# Altium footprint library LimeMicroAltiumLib.PcbLib: 876 footprints (part 16 of 57)
Each footprint in its own frame and in the unit in brackets; x right, y up, seen from the top. Pads: shape width x height; smd on the part's side, far side on the other; paste and mask are expansions set on the pad; w line width, h text height; cw(c..) or ccw(c..) is an arc to the next point about the centre after c.
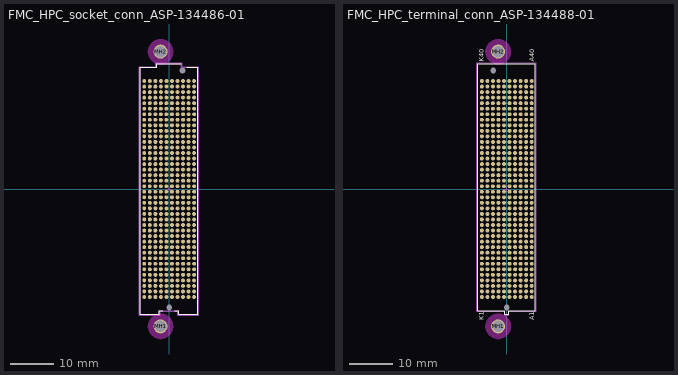
[diagram p15: the footprints below, top view; thin cyan lines are the x and y axes]

## FMC_HPC_socket_conn_ASP-134486-01 [mm]
pads (404):
  round 0.9 smd: A1(5.715,24.765) A2(5.715,23.495) A3(5.715,22.225) A4(5.715,20.955) A5(5.715,19.685) A6(5.715,18.415) A7(5.715,17.145) A8(5.715,15.875) A9(5.715,14.605) A10(5.715,13.335) A11(5.715,12.065) A12(5.715,10.795) A13(5.715,9.525) A14(5.715,8.255) A15(5.715,6.985) A16(5.715,5.715) A17(5.715,4.445) A18(5.715,3.175) A19(5.715,1.905) A20(5.715,0.635) A21(5.715,-0.635) A22(5.715,-1.905) A23(5.715,-3.175) A24(5.715,-4.445) A25(5.715,-5.715) A26(5.715,-6.985) A27(5.715,-8.255) A28(5.715,-9.525) A29(5.715,-10.795) A30(5.715,-12.065) A31(5.715,-13.335) A32(5.715,-14.605) A33(5.715,-15.875) A34(5.715,-17.145) A35(5.715,-18.415) A36(5.715,-19.685) A37(5.715,-20.955) A38(5.715,-22.225) A39(5.715,-23.495) A40(5.715,-24.765) B1(4.445,24.765) B2(4.445,23.495) B3(4.445,22.225) B4(4.445,20.955) B5(4.445,19.685) B6(4.445,18.415) B7(4.445,17.145) B8(4.445,15.875) B9(4.445,14.605) B10(4.445,13.335) B11(4.445,12.065) B12(4.445,10.795) B13(4.445,9.525) B14(4.445,8.255) B15(4.445,6.985) B16(4.445,5.715) B17(4.445,4.445) B18(4.445,3.175) B19(4.445,1.905) B20(4.445,0.635) B21(4.445,-0.635) B22(4.445,-1.905) B23(4.445,-3.175) B24(4.445,-4.445) B25(4.445,-5.715) B26(4.445,-6.985) B27(4.445,-8.255) B28(4.445,-9.525) B29(4.445,-10.795) B30(4.445,-12.065) B31(4.445,-13.335) B32(4.445,-14.605) B33(4.445,-15.875) B34(4.445,-17.145) B35(4.445,-18.415) B36(4.445,-19.685) B37(4.445,-20.955) B38(4.445,-22.225) B39(4.445,-23.495) B40(4.445,-24.765) C1(3.175,24.765) C2(3.175,23.495) C3(3.175,22.225) C4(3.175,20.955) C5(3.175,19.685) C6(3.175,18.415) C7(3.175,17.145) C8(3.175,15.875) C9(3.175,14.605) C10(3.175,13.335) C11(3.175,12.065) C12(3.175,10.795) C13(3.175,9.525) C14(3.175,8.255) C15(3.175,6.985) C16(3.175,5.715) C17(3.175,4.445) C18(3.175,3.175) C19(3.175,1.905) C20(3.175,0.635) C21(3.175,-0.635) C22(3.175,-1.905) C23(3.175,-3.175) C24(3.175,-4.445) C25(3.175,-5.715) C26(3.175,-6.985) C27(3.175,-8.255) C28(3.175,-9.525) C29(3.175,-10.795) C30(3.175,-12.065) C31(3.175,-13.335) C32(3.175,-14.605) C33(3.175,-15.875) C34(3.175,-17.145) C35(3.175,-18.415) C36(3.175,-19.685) C37(3.175,-20.955) C38(3.175,-22.225) C39(3.175,-23.495) C40(3.175,-24.765) D1(1.905,24.765) D2(1.905,23.495) D3(1.905,22.225) D4(1.905,20.955) D5(1.905,19.685) D6(1.905,18.415) D7(1.905,17.145) D8(1.905,15.875) D9(1.905,14.605) D10(1.905,13.335) D11(1.905,12.065) D12(1.905,10.795) D13(1.905,9.525) D14(1.905,8.255) D15(1.905,6.985) D16(1.905,5.715) D17(1.905,4.445) D18(1.905,3.175) D19(1.905,1.905) D20(1.905,0.635) D21(1.905,-0.635) D22(1.905,-1.905) D23(1.905,-3.175) D24(1.905,-4.445) D25(1.905,-5.715) D26(1.905,-6.985) D27(1.905,-8.255) D28(1.905,-9.525) D29(1.905,-10.795) D30(1.905,-12.065) D31(1.905,-13.335) D32(1.905,-14.605) D33(1.905,-15.875) D34(1.905,-17.145) D35(1.905,-18.415) D36(1.905,-19.685) D37(1.905,-20.955) D38(1.905,-22.225) D39(1.905,-23.495) D40(1.905,-24.765) E1(0.635,24.765) E2(0.635,23.495) E3(0.635,22.225) E4(0.635,20.955) E5(0.635,19.685) E6(0.635,18.415) E7(0.635,17.145) E8(0.635,15.875) E9(0.635,14.605) E10(0.635,13.335) E11(0.635,12.065) E12(0.635,10.795) E13(0.635,9.525) E14(0.635,8.255) E15(0.635,6.985) E16(0.635,5.715) E17(0.635,4.445) E18(0.635,3.175) E19(0.635,1.905) E20(0.635,0.635) E21(0.635,-0.635) E22(0.635,-1.905) E23(0.635,-3.175) E24(0.635,-4.445) E25(0.635,-5.715) E26(0.635,-6.985) E27(0.635,-8.255) E28(0.635,-9.525) E29(0.635,-10.795) E30(0.635,-12.065) E31(0.635,-13.335) E32(0.635,-14.605) E33(0.635,-15.875) E34(0.635,-17.145) E35(0.635,-18.415) E36(0.635,-19.685) E37(0.635,-20.955) E38(0.635,-22.225) E39(0.635,-23.495) E40(0.635,-24.765) F1(-0.635,24.765) F2(-0.635,23.495) F3(-0.635,22.225) F4(-0.635,20.955) F5(-0.635,19.685) F6(-0.635,18.415) F7(-0.635,17.145) F8(-0.635,15.875) F9(-0.635,14.605) F10(-0.635,13.335) F11(-0.635,12.065) F12(-0.635,10.795) F13(-0.635,9.525) F14(-0.635,8.255) F15(-0.635,6.985) F16(-0.635,5.715) F17(-0.635,4.445) F18(-0.635,3.175) F19(-0.635,1.905) F20(-0.635,0.635) F21(-0.635,-0.635) F22(-0.635,-1.905) F23(-0.635,-3.175) F24(-0.635,-4.445) F25(-0.635,-5.715) F26(-0.635,-6.985) F27(-0.635,-8.255) F28(-0.635,-9.525) F29(-0.635,-10.795) F30(-0.635,-12.065) F31(-0.635,-13.335) F32(-0.635,-14.605) F33(-0.635,-15.875) F34(-0.635,-17.145) F35(-0.635,-18.415) F36(-0.635,-19.685) F37(-0.635,-20.955) F38(-0.635,-22.225) F39(-0.635,-23.495) F40(-0.635,-24.765) G1(-1.905,24.765) G2(-1.905,23.495) G3(-1.905,22.225) G4(-1.905,20.955) G5(-1.905,19.685) G6(-1.905,18.415) G7(-1.905,17.145) G8(-1.905,15.875) G9(-1.905,14.605) G10(-1.905,13.335) G11(-1.905,12.065) G12(-1.905,10.795) G13(-1.905,9.525) G14(-1.905,8.255) G15(-1.905,6.985) G16(-1.905,5.715) G17(-1.905,4.445) G18(-1.905,3.175) G19(-1.905,1.905) G20(-1.905,0.635) G21(-1.905,-0.635) G22(-1.905,-1.905) G23(-1.905,-3.175) G24(-1.905,-4.445) G25(-1.905,-5.715) G26(-1.905,-6.985) G27(-1.905,-8.255) G28(-1.905,-9.525) G29(-1.905,-10.795) G30(-1.905,-12.065) G31(-1.905,-13.335) G32(-1.905,-14.605) G33(-1.905,-15.875) G34(-1.905,-17.145) G35(-1.905,-18.415) G36(-1.905,-19.685) G37(-1.905,-20.955) G38(-1.905,-22.225) G39(-1.905,-23.495) G40(-1.905,-24.765) H1(-3.175,24.765) H2(-3.175,23.495) H3(-3.175,22.225) H4(-3.175,20.955) H5(-3.175,19.685) H6(-3.175,18.415) H7(-3.175,17.145) H8(-3.175,15.875) H9(-3.175,14.605) H10(-3.175,13.335) H11(-3.175,12.065) H12(-3.175,10.795) H13(-3.175,9.525) H14(-3.175,8.255) H15(-3.175,6.985) H16(-3.175,5.715) H17(-3.175,4.445) H18(-3.175,3.175) H19(-3.175,1.905) H20(-3.175,0.635) H21(-3.175,-0.635) H22(-3.175,-1.905) H23(-3.175,-3.175) H24(-3.175,-4.445) H25(-3.175,-5.715) H26(-3.175,-6.985) H27(-3.175,-8.255) H28(-3.175,-9.525) H29(-3.175,-10.795) H30(-3.175,-12.065) H31(-3.175,-13.335) H32(-3.175,-14.605) H33(-3.175,-15.875) H34(-3.175,-17.145) H35(-3.175,-18.415) H36(-3.175,-19.685) H37(-3.175,-20.955) H38(-3.175,-22.225) H39(-3.175,-23.495) H40(-3.175,-24.765) J1(-4.445,24.765) J2(-4.445,23.495) J3(-4.445,22.225) J4(-4.445,20.955) J5(-4.445,19.685) J6(-4.445,18.415) J7(-4.445,17.145) J8(-4.445,15.875) J9(-4.445,14.605) J10(-4.445,13.335) J11(-4.445,12.065) J12(-4.445,10.795) J13(-4.445,9.525) J14(-4.445,8.255) J15(-4.445,6.985) J16(-4.445,5.715) J17(-4.445,4.445) J18(-4.445,3.175) J19(-4.445,1.905) J20(-4.445,0.635) J21(-4.445,-0.635) J22(-4.445,-1.905) J23(-4.445,-3.175) J24(-4.445,-4.445) J25(-4.445,-5.715) J26(-4.445,-6.985) J27(-4.445,-8.255) J28(-4.445,-9.525) J29(-4.445,-10.795) J30(-4.445,-12.065) J31(-4.445,-13.335) J32(-4.445,-14.605) J33(-4.445,-15.875) J34(-4.445,-17.145) J35(-4.445,-18.415) J36(-4.445,-19.685) J37(-4.445,-20.955) J38(-4.445,-22.225) J39(-4.445,-23.495) J40(-4.445,-24.765) K1(-5.715,24.765) K2(-5.715,23.495) K3(-5.715,22.225) K4(-5.715,20.955) K5(-5.715,19.685) K6(-5.715,18.415) K7(-5.715,17.145) K8(-5.715,15.875) K9(-5.715,14.605) K10(-5.715,13.335) K11(-5.715,12.065) K12(-5.715,10.795) K13(-5.715,9.525) K14(-5.715,8.255) K15(-5.715,6.985) K16(-5.715,5.715) K17(-5.715,4.445) K18(-5.715,3.175) K19(-5.715,1.905) K20(-5.715,0.635) K21(-5.715,-0.635) K22(-5.715,-1.905) K23(-5.715,-3.175) K24(-5.715,-4.445) K25(-5.715,-5.715) K26(-5.715,-6.985) K27(-5.715,-8.255) K28(-5.715,-9.525) K29(-5.715,-10.795) K30(-5.715,-12.065) K31(-5.715,-13.335) K32(-5.715,-14.605) K33(-5.715,-15.875) K34(-5.715,-17.145) K35(-5.715,-18.415) K36(-5.715,-19.685) K37(-5.715,-20.955) K38(-5.715,-22.225) K39(-5.715,-23.495) K40(-5.715,-24.765)
  round 3.2 hole 2.7: MH1(-1.98,-31.5) MH2(-1.98,31.5)
  round 0.97 hole 1.27 unplated: MH1(0,-27.18) MH2(3.05,27.18)
Top Layer keep-out:
  region: -1.98,-34.4 -2.17,-34.4 -2.547,-34.35 -2.914,-34.252 -3.265,-34.107 -3.595,-33.916 -3.896,-33.685 -4.165,-33.416 -4.396,-33.115 -4.587,-32.785 -4.732,-32.434 -4.83,-32.067 -4.88,-31.69 -4.88,-31.5 -4.88,-31.31 -4.83,-30.933 -4.732,-30.566 -4.587,-30.215 -4.396,-29.885 -4.165,-29.584 -3.896,-29.315 -3.595,-29.084 -3.265,-28.893 -2.914,-28.748 -2.547,-28.65 -2.17,-28.6 -1.98,-28.6 -1.79,-28.6 -1.413,-28.65 -1.046,-28.748 -0.695,-28.893 -0.365,-29.084 -0.064,-29.315 0.205,-29.584 0.436,-29.885 0.627,-30.215 0.772,-30.566 0.87,-30.933 0.92,-31.31 0.92,-31.5 0.92,-31.69 0.87,-32.067 0.772,-32.434 0.627,-32.785 0.436,-33.115 0.205,-33.416 -0.064,-33.685 -0.365,-33.916 -0.695,-34.107 -1.046,-34.252 -1.413,-34.35 -1.79,-34.4
  region: -1.98,28.6 -2.17,28.6 -2.547,28.65 -2.914,28.748 -3.265,28.893 -3.595,29.084 -3.896,29.315 -4.165,29.584 -4.396,29.885 -4.587,30.215 -4.732,30.566 -4.83,30.933 -4.88,31.31 -4.88,31.5 -4.88,31.69 -4.83,32.067 -4.732,32.434 -4.587,32.785 -4.396,33.115 -4.165,33.416 -3.896,33.685 -3.595,33.916 -3.265,34.107 -2.914,34.252 -2.547,34.35 -2.17,34.4 -1.98,34.4 -1.79,34.4 -1.413,34.35 -1.046,34.252 -0.695,34.107 -0.365,33.916 -0.064,33.685 0.205,33.416 0.436,33.115 0.627,32.785 0.772,32.434 0.87,32.067 0.92,31.69 0.92,31.5 0.92,31.31 0.87,30.933 0.772,30.566 0.627,30.215 0.436,29.885 0.205,29.584 -0.064,29.315 -0.365,29.084 -0.695,28.893 -1.046,28.748 -1.413,28.65 -1.79,28.6
Top Overlay:
  lines w0.2: -6.662,-28.727 -6.662,27.89 ; -6.66,-28.727 -2.241,-28.727 -2.241,-27.889 -1.5,-27.889 ; -6.66,27.889 -2.888,27.889 -2.888,28.727 2.801,28.727 ; 1.25,-27.889 2.153,-27.889 2.153,-28.727 6.574,-28.727 ; 4,27.889 6.573,27.889 6.573,-28.727
Mechanical 13:
  lines w0.1: -6.662,-28.727 -6.662,27.89 ; -6.66,-28.727 -2.241,-28.727 -2.241,-27.889 2.153,-27.889 2.153,-28.727 6.574,-28.727 ; -6.66,27.889 -2.888,27.889 -2.888,28.727 2.801,28.727 2.801,27.889 6.573,27.889 6.573,-28.727
Mechanical 15:
  lines w0.15: -0.5,0 0.5,0 ; 0,-0.5 0,0.5 ; -6.862,-28.927 -2.041,-28.927 -2.041,-28.089 1.953,-28.089 1.953,-28.927 6.773,-28.927 6.773,28.089 3.001,28.089 3.001,28.927 -3.088,28.927 -3.088,28.089 -6.862,28.089 -6.862,-28.927
  text ".Designator" at -0.1,0 h0.55
3D body: height 2, standoff 0.25, extent -0.806,-27.889 0.718,-26.492
3D body: height 0.73, standoff -1.27, extent -0.61,-27.736 0.508,-26.62
3D body: height 6.24, standoff 2.16, extent 3.697,-25.019 3.836,25.019
3D body: height 6.55, standoff 2.16, extent 3.281,25.019 4.252,25.502
3D body: height 6.55, standoff 2.16, extent 3.281,23.749 4.252,24.511
3D body: height 6.55, standoff 2.16, extent 3.281,22.479 4.252,23.241
3D body: height 6.55, standoff 2.16, extent 3.281,21.209 4.252,21.971
3D body: height 6.55, standoff 2.16, extent 3.281,19.939 4.252,20.701
3D body: height 6.55, standoff 2.16, extent 3.281,18.669 4.252,19.431
3D body: height 6.55, standoff 2.16, extent 3.281,17.399 4.252,18.161
3D body: height 6.55, standoff 2.16, extent 3.281,16.129 4.252,16.891
3D body: height 6.55, standoff 2.16, extent 3.281,14.859 4.252,15.621
3D body: height 6.55, standoff 2.16, extent 3.281,13.589 4.252,14.351
3D body: height 6.55, standoff 2.16, extent 3.281,12.319 4.252,13.081
3D body: height 6.55, standoff 2.16, extent 3.281,11.049 4.252,11.811
3D body: height 6.55, standoff 2.16, extent 3.281,9.779 4.252,10.541
3D body: height 6.55, standoff 2.16, extent 3.281,8.509 4.252,9.271
3D body: height 6.55, standoff 2.16, extent 3.281,7.239 4.252,8.001
3D body: height 6.55, standoff 2.16, extent 3.281,5.969 4.252,6.731
3D body: height 6.55, standoff 2.16, extent 3.281,4.699 4.252,5.461
3D body: height 6.55, standoff 2.16, extent 3.281,3.429 4.252,4.191
3D body: height 6.55, standoff 2.16, extent 3.281,2.159 4.252,2.921
3D body: height 6.55, standoff 2.16, extent 3.281,0.889 4.252,1.651
3D body: height 6.55, standoff 2.16, extent 3.281,-0.381 4.252,0.381
3D body: height 6.55, standoff 2.16, extent 3.281,-1.651 4.252,-0.889
3D body: height 6.55, standoff 2.16, extent 3.281,-2.921 4.252,-2.159
3D body: height 6.55, standoff 2.16, extent 3.281,-4.191 4.252,-3.429
3D body: height 6.55, standoff 2.16, extent 3.281,-5.461 4.252,-4.699
3D body: height 6.55, standoff 2.16, extent 3.281,-6.731 4.252,-5.969
3D body: height 6.55, standoff 2.16, extent 3.281,-8.001 4.252,-7.239
3D body: height 6.55, standoff 2.16, extent 3.281,-9.271 4.252,-8.509
3D body: height 6.55, standoff 2.16, extent 3.281,-10.541 4.252,-9.779
3D body: height 6.55, standoff 2.16, extent 3.281,-11.811 4.252,-11.049
3D body: height 6.55, standoff 2.16, extent 3.281,-13.081 4.252,-12.319
3D body: height 6.55, standoff 2.16, extent 3.281,-14.351 4.252,-13.589
3D body: height 6.55, standoff 2.16, extent 3.281,-15.621 4.252,-14.859
3D body: height 6.55, standoff 2.16, extent 3.281,-16.891 4.252,-16.129
3D body: height 6.55, standoff 2.16, extent 3.281,-18.161 4.252,-17.399
3D body: height 6.55, standoff 2.16, extent 3.281,-19.431 4.252,-18.669
3D body: height 6.55, standoff 2.16, extent 3.281,-20.701 4.252,-19.939
3D body: height 6.55, standoff 2.16, extent 3.281,-21.971 4.252,-21.209
3D body: height 6.55, standoff 2.16, extent 3.281,-23.241 4.252,-22.479
3D body: height 6.55, standoff 2.16, extent 3.281,-24.511 4.252,-23.749
3D body: height 2, standoff 0.51, extent -5.771,26.493 -3.853,27.255
3D body: height 2, standoff 0.51, extent 3.766,26.492 5.685,27.254
3D body: height 2, standoff 0, extent -3.854,26.492 -2.33,27.889
3D body: height 2, standoff 0, extent -0.806,26.492 0.718,27.889
3D body: height 2, standoff 0.25, extent 2.242,26.492 3.766,27.889
3D body: height 6.55, standoff 1.92, extent -6.662,27.053 6.571,28.729
3D body: height 2, standoff 0.51, extent -6.279,-27.889 5.684,-26.492
3D body: height 6.55, standoff 0, extent 5.685,-27.889 6.573,-26.493
3D body: height 2, standoff 0, extent 2.242,-27.889 3.766,-26.492
3D body: height 2, standoff 0, extent -3.854,-27.889 -2.33,-26.492
3D body: height 6.55, standoff 0, extent -6.66,-27.889 -5.772,-26.493
3D body: height 6.55, standoff 1.92, extent -6.659,-28.727 6.574,-27.052
3D body: height 6.55, standoff 0, extent 5.685,26.493 6.573,27.889
3D body: height 6.55, standoff 0, extent -6.662,26.494 -5.774,27.89
3D body: height 2, standoff 0.51, extent -3.854,26.492 3.766,27.889
3D body: height 6.55, standoff 2.16, extent 3.281,-25.502 4.252,-25.019
3D body: height 6.55, standoff 2.16, extent 0.741,-25.502 1.712,-25.019
3D body: height 6.55, standoff 2.16, extent 0.741,-24.511 1.712,-23.749
3D body: height 6.55, standoff 2.16, extent 0.741,-23.241 1.712,-22.479
3D body: height 6.55, standoff 2.16, extent 0.741,-21.971 1.712,-21.209
3D body: height 6.55, standoff 2.16, extent 0.741,-20.701 1.712,-19.939
3D body: height 6.55, standoff 2.16, extent 0.741,-19.431 1.712,-18.669
3D body: height 6.55, standoff 2.16, extent 0.741,-18.161 1.712,-17.399
3D body: height 6.55, standoff 2.16, extent 0.741,-16.891 1.712,-16.129
3D body: height 6.55, standoff 2.16, extent 0.741,-15.621 1.712,-14.859
3D body: height 6.55, standoff 2.16, extent 0.741,-14.351 1.712,-13.589
3D body: height 6.55, standoff 2.16, extent 0.741,-13.081 1.712,-12.319
3D body: height 6.55, standoff 2.16, extent 0.741,-11.811 1.712,-11.049
3D body: height 6.55, standoff 2.16, extent 0.741,-10.541 1.712,-9.779
3D body: height 6.55, standoff 2.16, extent 0.741,-9.271 1.712,-8.509
3D body: height 6.55, standoff 2.16, extent 0.741,-8.001 1.712,-7.239
3D body: height 6.55, standoff 2.16, extent 0.741,-6.731 1.712,-5.969
3D body: height 6.55, standoff 2.16, extent 0.741,-5.461 1.712,-4.699
3D body: height 6.55, standoff 2.16, extent 0.741,-4.191 1.712,-3.429
3D body: height 6.55, standoff 2.16, extent 0.741,-2.921 1.712,-2.159
3D body: height 6.55, standoff 2.16, extent 0.741,-1.651 1.712,-0.889
3D body: height 6.55, standoff 2.16, extent 0.741,-0.381 1.712,0.381
3D body: height 6.55, standoff 2.16, extent 0.741,0.889 1.712,1.651
3D body: height 6.55, standoff 2.16, extent 0.741,2.159 1.712,2.921
3D body: height 6.55, standoff 2.16, extent 0.741,3.429 1.712,4.191
3D body: height 6.55, standoff 2.16, extent 0.741,4.699 1.712,5.461
3D body: height 6.55, standoff 2.16, extent 0.741,5.969 1.712,6.731
3D body: height 6.55, standoff 2.16, extent 0.741,7.239 1.712,8.001
3D body: height 6.55, standoff 2.16, extent 0.741,8.509 1.712,9.271
3D body: height 6.55, standoff 2.16, extent 0.741,9.779 1.712,10.541
3D body: height 6.55, standoff 2.16, extent 0.741,11.049 1.712,11.811
3D body: height 6.55, standoff 2.16, extent 0.741,12.319 1.712,13.081
3D body: height 6.55, standoff 2.16, extent 0.741,13.589 1.712,14.351
3D body: height 6.55, standoff 2.16, extent 0.741,14.859 1.712,15.621
3D body: height 6.55, standoff 2.16, extent 0.741,16.129 1.712,16.891
3D body: height 6.55, standoff 2.16, extent 0.741,17.399 1.712,18.161
3D body: height 6.55, standoff 2.16, extent 0.741,18.669 1.712,19.431
3D body: height 6.55, standoff 2.16, extent 0.741,19.939 1.712,20.701
3D body: height 6.55, standoff 2.16, extent 0.741,21.209 1.712,21.971
3D body: height 6.55, standoff 2.16, extent 0.741,22.479 1.712,23.241
3D body: height 6.55, standoff 2.16, extent 0.741,23.749 1.712,24.511
3D body: height 6.55, standoff 2.16, extent 0.741,25.019 1.712,25.502
3D body: height 6.24, standoff 2.16, extent 1.157,-25.019 1.296,25.019
3D body: height 6.55, standoff 2.16, extent -1.799,-25.502 -0.828,-25.019
3D body: height 6.55, standoff 2.16, extent -1.799,-24.511 -0.828,-23.749
3D body: height 6.55, standoff 2.16, extent -1.799,-23.241 -0.828,-22.479
3D body: height 6.55, standoff 2.16, extent -1.799,-21.971 -0.828,-21.209
3D body: height 6.55, standoff 2.16, extent -1.799,-20.701 -0.828,-19.939
3D body: height 6.55, standoff 2.16, extent -1.799,-19.431 -0.828,-18.669
3D body: height 6.55, standoff 2.16, extent -1.799,-18.161 -0.828,-17.399
3D body: height 6.55, standoff 2.16, extent -1.799,-16.891 -0.828,-16.129
3D body: height 6.55, standoff 2.16, extent -1.799,-15.621 -0.828,-14.859
3D body: height 6.55, standoff 2.16, extent -1.799,-14.351 -0.828,-13.589
3D body: height 6.55, standoff 2.16, extent -1.799,-13.081 -0.828,-12.319
3D body: height 6.55, standoff 2.16, extent -1.799,-11.811 -0.828,-11.049
3D body: height 6.55, standoff 2.16, extent -1.799,-10.541 -0.828,-9.779
3D body: height 6.55, standoff 2.16, extent -1.799,-9.271 -0.828,-8.509
3D body: height 6.55, standoff 2.16, extent -1.799,-8.001 -0.828,-7.239
3D body: height 6.55, standoff 2.16, extent -1.799,-6.731 -0.828,-5.969
3D body: height 6.55, standoff 2.16, extent -1.799,-5.461 -0.828,-4.699
3D body: height 6.55, standoff 2.16, extent -1.799,-4.191 -0.828,-3.429
3D body: height 6.55, standoff 2.16, extent -1.799,-2.921 -0.828,-2.159
3D body: height 6.55, standoff 2.16, extent -1.799,-1.651 -0.828,-0.889
3D body: height 6.55, standoff 2.16, extent -1.799,-0.381 -0.828,0.381
3D body: height 6.55, standoff 2.16, extent -1.799,0.889 -0.828,1.651
3D body: height 6.55, standoff 2.16, extent -1.799,2.159 -0.828,2.921
3D body: height 6.55, standoff 2.16, extent -1.799,3.429 -0.828,4.191
3D body: height 6.55, standoff 2.16, extent -1.799,4.699 -0.828,5.461
3D body: height 6.55, standoff 2.16, extent -1.799,5.969 -0.828,6.731
3D body: height 6.55, standoff 2.16, extent -1.799,7.239 -0.828,8.001
3D body: height 6.55, standoff 2.16, extent -1.799,8.509 -0.828,9.271
3D body: height 6.55, standoff 2.16, extent -1.799,9.779 -0.828,10.541
3D body: height 6.55, standoff 2.16, extent -1.799,11.049 -0.828,11.811
3D body: height 6.55, standoff 2.16, extent -1.799,12.319 -0.828,13.081
3D body: height 6.55, standoff 2.16, extent -1.799,13.589 -0.828,14.351
3D body: height 6.55, standoff 2.16, extent -1.799,14.859 -0.828,15.621
3D body: height 6.55, standoff 2.16, extent -1.799,16.129 -0.828,16.891
3D body: height 6.55, standoff 2.16, extent -1.799,17.399 -0.828,18.161
3D body: height 6.55, standoff 2.16, extent -1.799,18.669 -0.828,19.431
3D body: height 6.55, standoff 2.16, extent -1.799,19.939 -0.828,20.701
3D body: height 6.55, standoff 2.16, extent -1.799,21.209 -0.828,21.971
3D body: height 6.55, standoff 2.16, extent -1.799,22.479 -0.828,23.241
3D body: height 6.55, standoff 2.16, extent -1.799,23.749 -0.828,24.511
3D body: height 6.55, standoff 2.16, extent -1.799,25.019 -0.828,25.502
3D body: height 6.24, standoff 2.16, extent -1.383,-25.019 -1.244,25.019
3D body: height 6.55, standoff 2.16, extent -4.339,-25.502 -3.368,-25.019
3D body: height 6.55, standoff 2.16, extent -4.339,-24.511 -3.368,-23.749
3D body: height 6.55, standoff 2.16, extent -4.339,-23.241 -3.368,-22.479
3D body: height 6.55, standoff 2.16, extent -4.339,-21.971 -3.368,-21.209
3D body: height 6.55, standoff 2.16, extent -4.339,-20.701 -3.368,-19.939
3D body: height 6.55, standoff 2.16, extent -4.339,-19.431 -3.368,-18.669
3D body: height 6.55, standoff 2.16, extent -4.339,-18.161 -3.368,-17.399
3D body: height 6.55, standoff 2.16, extent -4.339,-16.891 -3.368,-16.129
3D body: height 6.55, standoff 2.16, extent -4.339,-15.621 -3.368,-14.859
3D body: height 6.55, standoff 2.16, extent -4.339,-14.351 -3.368,-13.589
3D body: height 6.55, standoff 2.16, extent -4.339,-13.081 -3.368,-12.319
3D body: height 6.55, standoff 2.16, extent -4.339,-11.811 -3.368,-11.049
3D body: height 6.55, standoff 2.16, extent -4.339,-10.541 -3.368,-9.779
3D body: height 6.55, standoff 2.16, extent -4.339,-9.271 -3.368,-8.509
3D body: height 6.55, standoff 2.16, extent -4.339,-8.001 -3.368,-7.239
3D body: height 6.55, standoff 2.16, extent -4.339,-6.731 -3.368,-5.969
3D body: height 6.55, standoff 2.16, extent -4.339,-5.461 -3.368,-4.699
3D body: height 6.55, standoff 2.16, extent -4.339,-4.191 -3.368,-3.429
3D body: height 6.55, standoff 2.16, extent -4.339,-2.921 -3.368,-2.159
3D body: height 6.55, standoff 2.16, extent -4.339,-1.651 -3.368,-0.889
3D body: height 6.55, standoff 2.16, extent -4.339,-0.381 -3.368,0.381
3D body: height 6.55, standoff 2.16, extent -4.339,0.889 -3.368,1.651
3D body: height 6.55, standoff 2.16, extent -4.339,2.159 -3.368,2.921
3D body: height 6.55, standoff 2.16, extent -4.339,3.429 -3.368,4.191
3D body: height 6.55, standoff 2.16, extent -4.339,4.699 -3.368,5.461
3D body: height 6.55, standoff 2.16, extent -4.339,5.969 -3.368,6.731
3D body: height 6.55, standoff 2.16, extent -4.339,7.239 -3.368,8.001
3D body: height 6.55, standoff 2.16, extent -4.339,8.509 -3.368,9.271
3D body: height 6.55, standoff 2.16, extent -4.339,9.779 -3.368,10.541
3D body: height 6.55, standoff 2.16, extent -4.339,11.049 -3.368,11.811
3D body: height 6.55, standoff 2.16, extent -4.339,12.319 -3.368,13.081
3D body: height 6.55, standoff 2.16, extent -4.339,13.589 -3.368,14.351
3D body: height 6.55, standoff 2.16, extent -4.339,14.859 -3.368,15.621
3D body: height 6.55, standoff 2.16, extent -4.339,16.129 -3.368,16.891
3D body: height 6.55, standoff 2.16, extent -4.339,17.399 -3.368,18.161
3D body: height 6.55, standoff 2.16, extent -4.339,18.669 -3.368,19.431
3D body: height 6.55, standoff 2.16, extent -4.339,19.939 -3.368,20.701
3D body: height 6.55, standoff 2.16, extent -4.339,21.209 -3.368,21.971
3D body: height 6.55, standoff 2.16, extent -4.339,22.479 -3.368,23.241
3D body: height 6.55, standoff 2.16, extent -4.339,23.749 -3.368,24.511
3D body: height 6.55, standoff 2.16, extent -4.339,25.019 -3.368,25.502
3D body: height 6.24, standoff 2.16, extent -3.923,-25.019 -3.784,25.019
3D body: height 3.51, standoff 1.92, extent -6.659,-28.728 6.576,28.728
3D body: height 2, standoff -1.27, extent 2.503,26.74 3.597,27.619
3D body: height 6.55, standoff 2.16, extent 5.812,-28.727 6.577,27.891
3D body: height 6.55, standoff 2.16, extent -6.662,-28.727 -5.897,27.89

## FMC_HPC_terminal_conn_ASP-134488-01 [mm]
pads (404):
  round 0.9 smd: A1(5.715,-24.765) A2(5.715,-23.495) A3(5.715,-22.225) A4(5.715,-20.955) A5(5.715,-19.685) A6(5.715,-18.415) A7(5.715,-17.145) A8(5.715,-15.875) A9(5.715,-14.605) A10(5.715,-13.335) A11(5.715,-12.065) A12(5.715,-10.795) A13(5.715,-9.525) A14(5.715,-8.255) A15(5.715,-6.985) A16(5.715,-5.715) A17(5.715,-4.445) A18(5.715,-3.175) A19(5.715,-1.905) A20(5.715,-0.635) A21(5.715,0.635) A22(5.715,1.905) A23(5.715,3.175) A24(5.715,4.445) A25(5.715,5.715) A26(5.715,6.985) A27(5.715,8.255) A28(5.715,9.525) A29(5.715,10.795) A30(5.715,12.065) A31(5.715,13.335) A32(5.715,14.605) A33(5.715,15.875) A34(5.715,17.145) A35(5.715,18.415) A36(5.715,19.685) A37(5.715,20.955) A38(5.715,22.225) A39(5.715,23.495) A40(5.715,24.765) B1(4.445,-24.765) B2(4.445,-23.495) B3(4.445,-22.225) B4(4.445,-20.955) B5(4.445,-19.685) B6(4.445,-18.415) B7(4.445,-17.145) B8(4.445,-15.875) B9(4.445,-14.605) B10(4.445,-13.335) B11(4.445,-12.065) B12(4.445,-10.795) B13(4.445,-9.525) B14(4.445,-8.255) B15(4.445,-6.985) B16(4.445,-5.715) B17(4.445,-4.445) B18(4.445,-3.175) B19(4.445,-1.905) B20(4.445,-0.635) B21(4.445,0.635) B22(4.445,1.905) B23(4.445,3.175) B24(4.445,4.445) B25(4.445,5.715) B26(4.445,6.985) B27(4.445,8.255) B28(4.445,9.525) B29(4.445,10.795) B30(4.445,12.065) B31(4.445,13.335) B32(4.445,14.605) B33(4.445,15.875) B34(4.445,17.145) B35(4.445,18.415) B36(4.445,19.685) B37(4.445,20.955) B38(4.445,22.225) B39(4.445,23.495) B40(4.445,24.765) C1(3.175,-24.765) C2(3.175,-23.495) C3(3.175,-22.225) C4(3.175,-20.955) C5(3.175,-19.685) C6(3.175,-18.415) C7(3.175,-17.145) C8(3.175,-15.875) C9(3.175,-14.605) C10(3.175,-13.335) C11(3.175,-12.065) C12(3.175,-10.795) C13(3.175,-9.525) C14(3.175,-8.255) C15(3.175,-6.985) C16(3.175,-5.715) C17(3.175,-4.445) C18(3.175,-3.175) C19(3.175,-1.905) C20(3.175,-0.635) C21(3.175,0.635) C22(3.175,1.905) C23(3.175,3.175) C24(3.175,4.445) C25(3.175,5.715) C26(3.175,6.985) C27(3.175,8.255) C28(3.175,9.525) C29(3.175,10.795) C30(3.175,12.065) C31(3.175,13.335) C32(3.175,14.605) C33(3.175,15.875) C34(3.175,17.145) C35(3.175,18.415) C36(3.175,19.685) C37(3.175,20.955) C38(3.175,22.225) C39(3.175,23.495) C40(3.175,24.765) D1(1.905,-24.765) D2(1.905,-23.495) D3(1.905,-22.225) D4(1.905,-20.955) D5(1.905,-19.685) D6(1.905,-18.415) D7(1.905,-17.145) D8(1.905,-15.875) D9(1.905,-14.605) D10(1.905,-13.335) D11(1.905,-12.065) D12(1.905,-10.795) D13(1.905,-9.525) D14(1.905,-8.255) D15(1.905,-6.985) D16(1.905,-5.715) D17(1.905,-4.445) D18(1.905,-3.175) D19(1.905,-1.905) D20(1.905,-0.635) D21(1.905,0.635) D22(1.905,1.905) D23(1.905,3.175) D24(1.905,4.445) D25(1.905,5.715) D26(1.905,6.985) D27(1.905,8.255) D28(1.905,9.525) D29(1.905,10.795) D30(1.905,12.065) D31(1.905,13.335) D32(1.905,14.605) D33(1.905,15.875) D34(1.905,17.145) D35(1.905,18.415) D36(1.905,19.685) D37(1.905,20.955) D38(1.905,22.225) D39(1.905,23.495) D40(1.905,24.765) E1(0.635,-24.765) E2(0.635,-23.495) E3(0.635,-22.225) E4(0.635,-20.955) E5(0.635,-19.685) E6(0.635,-18.415) E7(0.635,-17.145) E8(0.635,-15.875) E9(0.635,-14.605) E10(0.635,-13.335) E11(0.635,-12.065) E12(0.635,-10.795) E13(0.635,-9.525) E14(0.635,-8.255) E15(0.635,-6.985) E16(0.635,-5.715) E17(0.635,-4.445) E18(0.635,-3.175) E19(0.635,-1.905) E20(0.635,-0.635) E21(0.635,0.635) E22(0.635,1.905) E23(0.635,3.175) E24(0.635,4.445) E25(0.635,5.715) E26(0.635,6.985) E27(0.635,8.255) E28(0.635,9.525) E29(0.635,10.795) E30(0.635,12.065) E31(0.635,13.335) E32(0.635,14.605) E33(0.635,15.875) E34(0.635,17.145) E35(0.635,18.415) E36(0.635,19.685) E37(0.635,20.955) E38(0.635,22.225) E39(0.635,23.495) E40(0.635,24.765) F1(-0.635,-24.765) F2(-0.635,-23.495) F3(-0.635,-22.225) F4(-0.635,-20.955) F5(-0.635,-19.685) F6(-0.635,-18.415) F7(-0.635,-17.145) F8(-0.635,-15.875) F9(-0.635,-14.605) F10(-0.635,-13.335) F11(-0.635,-12.065) F12(-0.635,-10.795) F13(-0.635,-9.525) F14(-0.635,-8.255) F15(-0.635,-6.985) F16(-0.635,-5.715) F17(-0.635,-4.445) F18(-0.635,-3.175) F19(-0.635,-1.905) F20(-0.635,-0.635) F21(-0.635,0.635) F22(-0.635,1.905) F23(-0.635,3.175) F24(-0.635,4.445) F25(-0.635,5.715) F26(-0.635,6.985) F27(-0.635,8.255) F28(-0.635,9.525) F29(-0.635,10.795) F30(-0.635,12.065) F31(-0.635,13.335) F32(-0.635,14.605) F33(-0.635,15.875) F34(-0.635,17.145) F35(-0.635,18.415) F36(-0.635,19.685) F37(-0.635,20.955) F38(-0.635,22.225) F39(-0.635,23.495) F40(-0.635,24.765) G1(-1.905,-24.765) G2(-1.905,-23.495) G3(-1.905,-22.225) G4(-1.905,-20.955) G5(-1.905,-19.685) G6(-1.905,-18.415) G7(-1.905,-17.145) G8(-1.905,-15.875) G9(-1.905,-14.605) G10(-1.905,-13.335) G11(-1.905,-12.065) G12(-1.905,-10.795) G13(-1.905,-9.525) G14(-1.905,-8.255) G15(-1.905,-6.985) G16(-1.905,-5.715) G17(-1.905,-4.445) G18(-1.905,-3.175) G19(-1.905,-1.905) G20(-1.905,-0.635) G21(-1.905,0.635) G22(-1.905,1.905) G23(-1.905,3.175) G24(-1.905,4.445) G25(-1.905,5.715) G26(-1.905,6.985) G27(-1.905,8.255) G28(-1.905,9.525) G29(-1.905,10.795) G30(-1.905,12.065) G31(-1.905,13.335) G32(-1.905,14.605) G33(-1.905,15.875) G34(-1.905,17.145) G35(-1.905,18.415) G36(-1.905,19.685) G37(-1.905,20.955) G38(-1.905,22.225) G39(-1.905,23.495) G40(-1.905,24.765) H1(-3.175,-24.765) H2(-3.175,-23.495) H3(-3.175,-22.225) H4(-3.175,-20.955) H5(-3.175,-19.685) H6(-3.175,-18.415) H7(-3.175,-17.145) H8(-3.175,-15.875) H9(-3.175,-14.605) H10(-3.175,-13.335) H11(-3.175,-12.065) H12(-3.175,-10.795) H13(-3.175,-9.525) H14(-3.175,-8.255) H15(-3.175,-6.985) H16(-3.175,-5.715) H17(-3.175,-4.445) H18(-3.175,-3.175) H19(-3.175,-1.905) H20(-3.175,-0.635) H21(-3.175,0.635) H22(-3.175,1.905) H23(-3.175,3.175) H24(-3.175,4.445) H25(-3.175,5.715) H26(-3.175,6.985) H27(-3.175,8.255) H28(-3.175,9.525) H29(-3.175,10.795) H30(-3.175,12.065) H31(-3.175,13.335) H32(-3.175,14.605) H33(-3.175,15.875) H34(-3.175,17.145) H35(-3.175,18.415) H36(-3.175,19.685) H37(-3.175,20.955) H38(-3.175,22.225) H39(-3.175,23.495) H40(-3.175,24.765) J1(-4.445,-24.765) J2(-4.445,-23.495) J3(-4.445,-22.225) J4(-4.445,-20.955) J5(-4.445,-19.685) J6(-4.445,-18.415) J7(-4.445,-17.145) J8(-4.445,-15.875) J9(-4.445,-14.605) J10(-4.445,-13.335) J11(-4.445,-12.065) J12(-4.445,-10.795) J13(-4.445,-9.525) J14(-4.445,-8.255) J15(-4.445,-6.985) J16(-4.445,-5.715) J17(-4.445,-4.445) J18(-4.445,-3.175) J19(-4.445,-1.905) J20(-4.445,-0.635) J21(-4.445,0.635) J22(-4.445,1.905) J23(-4.445,3.175) J24(-4.445,4.445) J25(-4.445,5.715) J26(-4.445,6.985) J27(-4.445,8.255) J28(-4.445,9.525) J29(-4.445,10.795) J30(-4.445,12.065) J31(-4.445,13.335) J32(-4.445,14.605) J33(-4.445,15.875) J34(-4.445,17.145) J35(-4.445,18.415) J36(-4.445,19.685) J37(-4.445,20.955) J38(-4.445,22.225) J39(-4.445,23.495) J40(-4.445,24.765) K1(-5.715,-24.765) K2(-5.715,-23.495) K3(-5.715,-22.225) K4(-5.715,-20.955) K5(-5.715,-19.685) K6(-5.715,-18.415) K7(-5.715,-17.145) K8(-5.715,-15.875) K9(-5.715,-14.605) K10(-5.715,-13.335) K11(-5.715,-12.065) K12(-5.715,-10.795) K13(-5.715,-9.525) K14(-5.715,-8.255) K15(-5.715,-6.985) K16(-5.715,-5.715) K17(-5.715,-4.445) K18(-5.715,-3.175) K19(-5.715,-1.905) K20(-5.715,-0.635) K21(-5.715,0.635) K22(-5.715,1.905) K23(-5.715,3.175) K24(-5.715,4.445) K25(-5.715,5.715) K26(-5.715,6.985) K27(-5.715,8.255) K28(-5.715,9.525) K29(-5.715,10.795) K30(-5.715,12.065) K31(-5.715,13.335) K32(-5.715,14.605) K33(-5.715,15.875) K34(-5.715,17.145) K35(-5.715,18.415) K36(-5.715,19.685) K37(-5.715,20.955) K38(-5.715,22.225) K39(-5.715,23.495) K40(-5.715,24.765)
  round 3.2 hole 2.7: MH1(-1.98,-31.5) MH2(-1.98,31.5)
  round 0.97 hole 1.27 unplated: MH1(0,-27.18) MH2(-3.05,27.18)
Top Layer keep-out:
  region: -1.98,28.6 -2.17,28.6 -2.547,28.65 -2.914,28.748 -3.265,28.893 -3.595,29.084 -3.896,29.315 -4.165,29.584 -4.396,29.885 -4.587,30.215 -4.732,30.566 -4.83,30.933 -4.88,31.31 -4.88,31.5 -4.88,31.69 -4.83,32.067 -4.732,32.434 -4.587,32.785 -4.396,33.115 -4.165,33.416 -3.896,33.685 -3.595,33.916 -3.265,34.107 -2.914,34.252 -2.547,34.35 -2.17,34.4 -1.98,34.4 -1.79,34.4 -1.413,34.35 -1.046,34.252 -0.695,34.107 -0.365,33.916 -0.064,33.685 0.205,33.416 0.436,33.115 0.627,32.785 0.772,32.434 0.87,32.067 0.92,31.69 0.92,31.5 0.92,31.31 0.87,30.933 0.772,30.566 0.627,30.215 0.436,29.885 0.205,29.584 -0.064,29.315 -0.365,29.084 -0.695,28.893 -1.046,28.748 -1.413,28.65 -1.79,28.6
  region: -1.98,-34.4 -2.17,-34.4 -2.547,-34.35 -2.914,-34.252 -3.265,-34.107 -3.595,-33.916 -3.896,-33.685 -4.165,-33.416 -4.396,-33.115 -4.587,-32.785 -4.732,-32.434 -4.83,-32.067 -4.88,-31.69 -4.88,-31.5 -4.88,-31.31 -4.83,-30.933 -4.732,-30.566 -4.587,-30.215 -4.396,-29.885 -4.165,-29.584 -3.896,-29.315 -3.595,-29.084 -3.265,-28.893 -2.914,-28.748 -2.547,-28.65 -2.17,-28.6 -1.98,-28.6 -1.79,-28.6 -1.413,-28.65 -1.046,-28.748 -0.695,-28.893 -0.365,-29.084 -0.064,-29.315 0.205,-29.584 0.436,-29.885 0.627,-30.215 0.772,-30.566 0.87,-30.933 0.92,-31.31 0.92,-31.5 0.92,-31.69 0.87,-32.067 0.772,-32.434 0.627,-32.785 0.436,-33.115 0.205,-33.416 -0.064,-33.685 -0.365,-33.916 -0.695,-34.107 -1.046,-34.252 -1.413,-34.35 -1.79,-34.4
Top Overlay:
  lines w0.2: -6.662,-27.89 -6.662,28.727 ; -6.66,-27.889 -0.5,-27.889 -0.5,-28.727 0.5,-28.727 0.5,-27.9 0.511,-27.889 4,-27.889 6.573,-27.889 6.573,28.727 ; -6.66,28.727 2.153,28.727 6.574,28.727
  text "A1" at 6.325,-30.075 h1.1
  text "K1" at -5.25,-30.05 h1.1
  text "A40" at 6.275,29.2 h1.1
  text "K40" at -5.3,29.225 h1.1
Mechanical 15:
  lines w0.15: -0.5,0 0.5,0 ; 0,-0.5 0,0.5 ; -6.862,-28.089 -6.862,28.927 -2.041,28.927 1.953,28.927 6.773,28.927 6.773,-28.089 0.5,-28.089 0.5,-28.927 -0.5,-28.927 -0.5,-28.089 -6.862,-28.089
  text ".Designator" at 0,0 h0.55
  text "A40" at 6.275,29.2 h1.1
  text "K40" at -5.3,29.225 h1.1
  text "K1" at -5.25,-30.05 h1.1
  text "A1" at 6.325,-30.075 h1.1
3D body "ASP-134602-01.stp": height 5.76, standoff -1.12, extent -7.341,-28.775 7.341,27.892